# Altium schematic symbol library ERA2AED103X.SchLib: 1 symbol
Pins are listed as number, name and electrical type; pins without a type are passive.

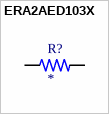
[diagram p0: symbol ERA2AED103X]

## ERA2AED103X
designator R?
10 kOhms ±0.5% 0.063W, 1/16W Chip Resistor 0402 (1005 Metric) Automotive AEC-Q200 Thin Film; MF: Yageo; MP: RC0402FR-070RL; SnapEDA_Link: https://www.snapeda.com/parts/RC0402FR-070RL/Yageo/view-part/?ref=snap; Package: 0402 Yageo; Value: *; Check_prices: https://www.snapeda.com/parts/RC0402FR-070RL/Yageo/view-part/?ref=eda; ComponentLink1Description: Digikey link; ComponentLink1URL: https://www.digikey.com/en/products/detail/panasonic-industry/ERA-2AED103X/1706126
footprint RES_ERA2A_PAN
pins: 1, 2